# Altium schematic symbol library PEC11R-4220F-S0012.SchLib: 1 symbol
Pins are listed as number, name and electrical type; pins without a type are passive.

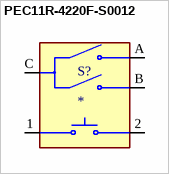
[diagram p0: symbol PEC11R-4220F-S0012]

## PEC11R-4220F-S0012
designator S?
Rotary Encoder Mechanical 12 Quadrature (Incremental) Vertical; MF: TE Connectivity; MP: 2-1879314-1; SnapEDA_Link: https://www.snapeda.com/parts/2-1879314-1/TE+Connectivity/view-part/?ref=snap; Package: None; Value: *; Check_prices: https://www.snapeda.com/parts/2-1879314-1/TE+Connectivity/view-part/?ref=eda
footprint PEC11R-4220F-S0012
pins: 1, 2, A, B, C